# Altium schematic symbol library Schlib1.SchLib: 72 symbols (part 2 of 3)
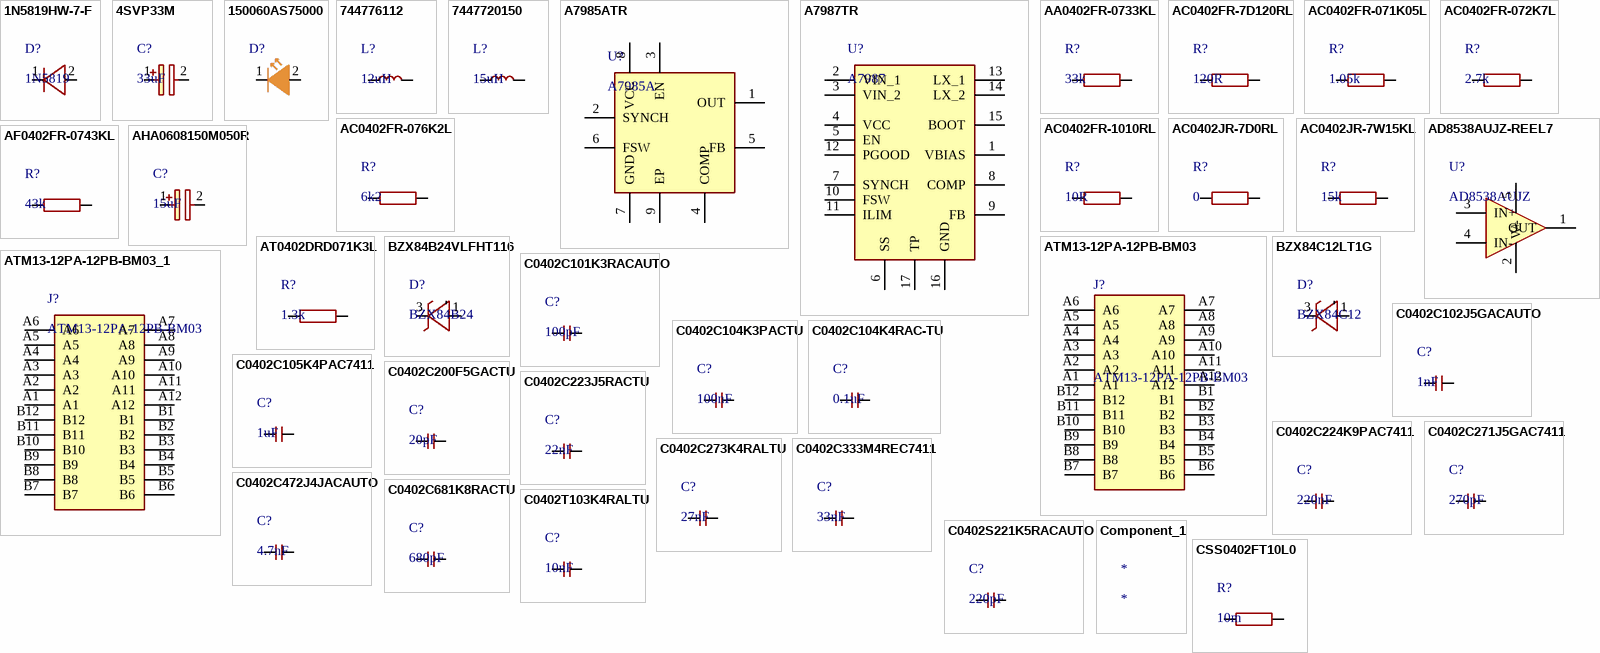
[diagram p2: symbols 1N5819HW-7-F to CSS0402FT10L0]

## C0402C271J5GAC7411
designator C?, comment 270pF
Ceramic Capacitor, Multilayer, Ceramic, 50V, 5% +Tol, 5% -Tol, C0G, 30ppm/Cel TC, 0.00027uF, Surface Mount, 0402; Manufacturer: KEMET; Manufacturer Part Number: C0402C271J5GAC7411; Multilayer: Yes; Supplier: Mouser; Supplier Part Number: 80-C0402C271J5G7411; RoHS: Yes; Category: Ceramic Capacitors; Stock: 143215; Pricing: 1=0.1, 10=0.018, 50=0.018, 100=0.011, 1000=0.008, 10000=0.007 (USD); Mounting Technology: Surface Mount; Pins: 2; Dielectric Material: Ceramic; Package Shape: Rectangular; Case/Package: 0402; Terminal Finish: Nickel; Min Operating Temperature: -55°C; Max Operating Temperature: 125°C; JESD-609 Code: e3; Value: 270pF; Capacitor Type: Ceramic; Tolerance  (fill in as +-): 5%; Package Style: SMTMeter; Packaging: Tape and Reel; Tolerance (fill in as +-): 5%; Rated DC Voltage (URdc): 50V; Temperature Characteristics Code: C0G; Termination: Wraparound; Length: 1mm; Width: 0.5mm; Height: 0.5mm; Reach SVHC Compliant: Yes; RoHS Compliant: Yes; ComponentLink1URL: https://datasheet.ciiva.com:443/pdfs/VipMasterIC/IC/KEME/KEME-S-A0005605168/KEME-S-A0005605168-1.pdf?src-supplier=IHS+Markit; ComponentLink1Description: https://datasheet.ciiva.com:443/pdfs/VipMasterIC/IC/KEME/KEME-S-A0005605168/KEME-S-A0005605168-1.pdf?src-supplier=IHS+Markit
footprint C0402
pins: 1, 2

## C0402C273K4RALTU
designator C?, comment 27nF
.027Uf 16.0V Rohs Compliant: No; Manufacturer: KEMET; Manufacturer Part Number: C0402C273K4RALTU; Supplier: Mouser; Supplier Part Number: 80-C0402C273K4RALTU; RoHS: No; Stock: 9745; Pricing: 1=0.57, 10=0.374, 50=0.374, 100=0.225, 1000=0.167, 10000=0.115 (USD)
footprint C0402
pins: 1, 2

## C0402C333M4REC7411
designator C?, comment 33nF
Ceramic Capacitor, Multilayer, Ceramic, 16V, 20% +Tol, 20% -Tol, X7R, 15% TC, 0.033uF, Surface Mount, 0402; Manufacturer: KEMET; Manufacturer Part Number: C0402C333M4REC7411; Supplier: Mouser; Supplier Part Number: 80-C0402C333M4RECLR; RoHS: Yes; Category: Ceramic Capacitors; Stock: 47561; Pricing: 1=0.1, 10=0.059, 50=0.059, 100=0.036, 1000=0.026, 10000=0.018 (USD); Pins: 2; Dielectric Material: Ceramic; Capacitor Type: Ceramic; Reach SVHC Compliant: Yes; RoHS Compliant: Yes; ComponentLink1URL: https://datasheet.ciiva.com:443/pdfs/VipMasterIC/IC/KEME/KEME-S-A0008958450/KEME-S-A0008958450-1.pdf?src-supplier=IHS+Markit; ComponentLink1Description: https://datasheet.ciiva.com:443/pdfs/VipMasterIC/IC/KEME/KEME-S-A0008958450/KEME-S-A0008958450-1.pdf?src-supplier=IHS+Markit; ComponentLink2URL: https://api.kemet.com/component-edge/download/datasheet/C0402C333M4REC7411.pdf?src-supplier=Digikey; ComponentLink2Description: https://api.kemet.com/component-edge/download/datasheet/C0402C333M4REC7411.pdf?src-supplier=Digikey
footprint C0402
pins: 1, 2

## C0402C472J4JACAUTO
designator C?, comment 4.7nF
Cap Ceramic 0.0047uF 16V U2J 5% Pad SMD 0402 125C T/R; Manufacturer: KEMET; Manufacturer Part Number: C0402C472J4JACAUTO; Supplier: Mouser; Supplier Part Number: 80-C0402C472J4JAUTO; RoHS: No; Category: Ceramic Capacitors; Stock: 12001; Pricing: 1=0.48, 10=0.311, 50=0.311, 100=0.216, 1000=0.162, 10000=0.112 (USD)
footprint C0402
pins: 1, 2

## C0402C681K8RACTU
designator C?, comment 680pF
Ceramic Capacitor, Multilayer, Ceramic, 10V, 10% +Tol, 10% -Tol, X7R, 15% TC, 0.00068uF, Surface Mount, 0402; Manufacturer: KEMET; Manufacturer Part Number: C0402C681K8RACTU; Multilayer: Yes; Supplier: Mouser; Supplier Part Number: 80-C0402C681K8RACTU; RoHS: Yes; Category: Capacitors; Stock: 44783; Pricing: 1=0.34, 10=0.202, 50=0.202, 100=0.132, 1000=0.095, 10000=0.077 (USD); Mounting Technology: Surface Mount; Pins: 2; Dielectric Material: Ceramic; Case/Package: 0402; Terminal Finish: Nickel; Package Shape: Rectangular; Min Operating Temperature: -55°C; Max Operating Temperature: 125°C; JESD-609 Code: e3; Value: 680pF; Capacitor Type: Ceramic; Tolerance  (fill in as +-): 10%; Package Style: SMTMeter; Packaging: Tape and Reel; Tolerance (fill in as +-): 10%; Rated DC Voltage (URdc): 10V; Temperature Characteristics Code: X7R; Termination: Wraparound; Length: 1mm; Width: 0.5mm; Height: 0.5mm; Reach SVHC Compliant: Yes; RoHS Compliant: Yes; ComponentLink1URL: https://datasheet.ciiva.com:443/pdfs/VipMasterIC/IC/KEME/KEME-S-A0008991654/KEME-S-A0008991654-1.pdf?src-supplier=IHS+Markit; ComponentLink1Description: https://datasheet.ciiva.com:443/pdfs/VipMasterIC/IC/KEME/KEME-S-A0008991654/KEME-S-A0008991654-1.pdf?src-supplier=IHS+Markit
footprint C0402
pins: 1, 2

## C0402S221K5RACAUTO
designator C?, comment 220pF
Ceramic Capacitor, Multilayer, Ceramic, 50V, 10% +Tol, 10% -Tol, X7R, 15% TC, 0.00022uF, Surface Mount, 0402; Manufacturer: KEMET; Manufacturer Part Number: C0402S221K5RACAUTO; Supplier: Mouser; Supplier Part Number: 80-C0402S221K5RAUTO; RoHS: Yes; Category: Ceramic Capacitors; Stock: 19717; Pricing: 1=0.43, 10=0.225, 50=0.225, 100=0.163, 1000=0.127, 10000=0.098 (USD); Pins: 2; Dielectric Material: Ceramic; Capacitor Type: Ceramic; Reach SVHC Compliant: Yes; RoHS Compliant: Yes; ComponentLink1URL: https://datasheet.ciiva.com:443/pdfs/VipMasterIC/IC/KEME/KEME-S-A0008958426/KEME-S-A0008958426-1.pdf?src-supplier=IHS+Markit; ComponentLink1Description: https://datasheet.ciiva.com:443/pdfs/VipMasterIC/IC/KEME/KEME-S-A0008958426/KEME-S-A0008958426-1.pdf?src-supplier=IHS+Markit
footprint C0402
pins: 1, 2

## C0402T103K4RALTU
designator C?, comment 10nF
Ceramic Capacitor, Multilayer, Ceramic, 16V, 10% +Tol, 10% -Tol, X7R, 15% TC, 0.01uF, Surface Mount, 0402; Manufacturer: KEMET; Manufacturer Part Number: C0402T103K4RALTU; Multilayer: Yes; Supplier: Mouser; Supplier Part Number: 80-C0402T103K4RALTU; RoHS: No; Category: Ceramic Capacitors; Stock: 17779; Pricing: 1=0.58, 10=0.42, 50=0.42, 100=0.337, 1000=0.294, 10000=0.246 (USD); Mounting Technology: Surface Mount; Pins: 2; Dielectric Material: Ceramic; Package Shape: Rectangular; Case/Package: 0402; Terminal Finish: Nickel; Min Operating Temperature: -55°C; Max Operating Temperature: 125°C; JESD-609 Code: e0; Value: 10nF; Capacitor Type: Ceramic; Tolerance  (fill in as +-): 10%; Package Style: SMTMeter; Packaging: Tape and Reel; Tolerance (fill in as +-): 10%; Rated DC Voltage (URdc): 16V; Temperature Characteristics Code: X7R; Termination: Wraparound; Length: 1mm; Width: 0.5mm; Height: 0.5mm; RoHS Compliant: No; Reach SVHC Compliant: No; ComponentLink1URL: https://datasheet.ciiva.com:443/pdfs/VipMasterIC/IC/KEME/KEME-S-A0008487487/KEME-S-A0008487487-1.pdf?src-supplier=IHS+Markit; ComponentLink1Description: https://datasheet.ciiva.com:443/pdfs/VipMasterIC/IC/KEME/KEME-S-A0008487487/KEME-S-A0008487487-1.pdf?src-supplier=IHS+Markit; ComponentLink2URL: https://datasheet.ciiva.com/15379/kem-c1027-x7r-cots-smd-15379193.pdf?src-supplier=Mouser; ComponentLink2Description: https://datasheet.ciiva.com/15379/kem-c1027-x7r-cots-smd-15379193.pdf?src-supplier=Mouser; ComponentLink3URL: https://datasheet.ciiva.com/148/kem-c1027-x7r-cots-smd-148853.pdf?src-supplier=Digikey; ComponentLink3Description: https://datasheet.ciiva.com/148/kem-c1027-x7r-cots-smd-148853.pdf?src-supplier=Digikey; ComponentLink4URL: https://datasheet.ciiva.com/148/kem-c1027-x7r-cots-smd-148851.pdf?src-supplier=Digikey; ComponentLink4Description: https://datasheet.ciiva.com/148/kem-c1027-x7r-cots-smd-148851.pdf?src-supplier=Digikey; ComponentLink5URL: https://datasheet.ciiva.com/148/kem-c1027-x7r-cots-smd-148852.pdf?src-supplier=Digikey; ComponentLink5Description: https://datasheet.ciiva.com/148/kem-c1027-x7r-cots-smd-148852.pdf?src-supplier=Digikey
footprint C0402
pins: 1, 2

## Component_1
designator *

## CSS0402FT10L0
designator R?, comment 10m
Fixed Resistor, Metal Alloy, 0.33W, 0.01ohm, 1% +/-Tol, 100ppm/Cel, Surface Mount, 0402; Manufacturer: Stackpole Electronics; Manufacturer Part Number: CSS0402FT10L0; Supplier: Mouser; Supplier Part Number: 708-CSS0402FT10L0; RoHS: Yes; Category: Chip SMD Resistors; Stock: 3752; Pricing: 1=0.44, 10=0.272, 50=0.225, 100=0.187, 1000=0.142, 10000=0.116 (USD)
footprint CSS0402FT10L0
pins: 1, 2

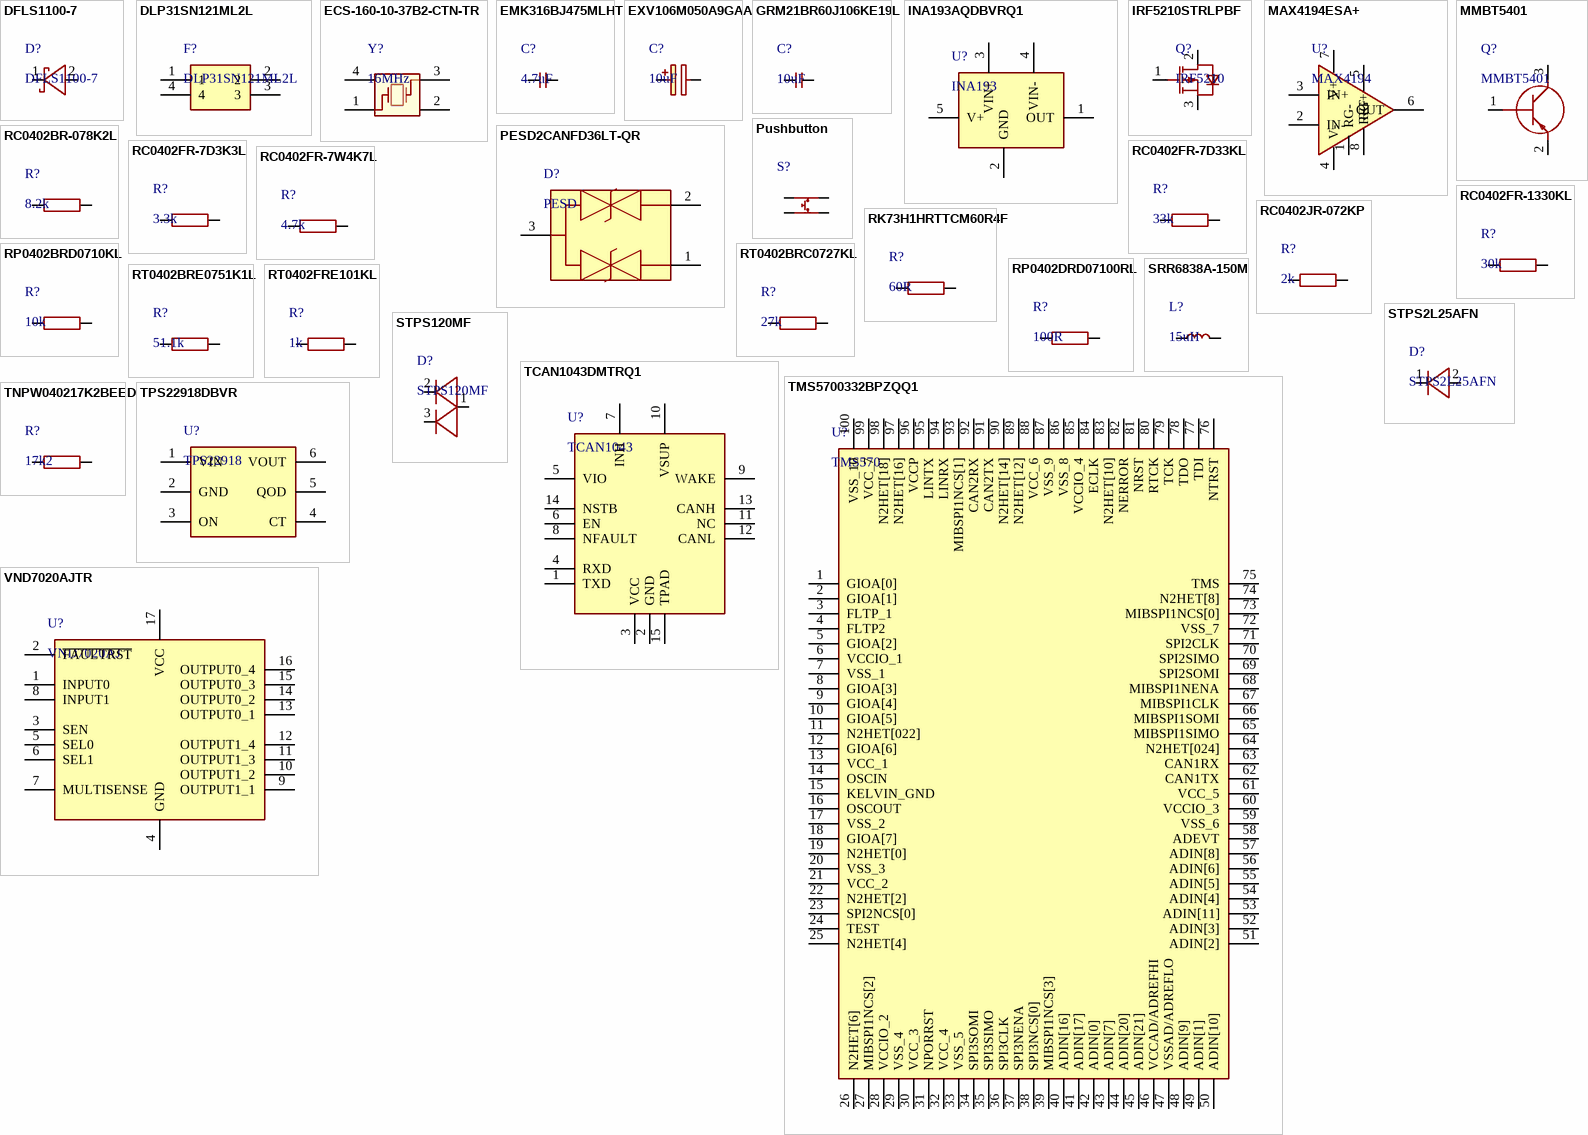
[diagram p1: symbols DFLS1100-7 to VND7020AJTR]

## DFLS1100-7
designator D?
Rectifier Diode, Schottky, 1 Phase, 1 Element, 1A, 100V V(RRM), Silicon; Manufacturer: Diodes; Package Body Material: Plastic; Case Connection: CATHODE; Forward Voltage: 770mV; Non-rep Pk Forward Current-Max: 40A; Number of Elements: 1; Time @ Peak Reflow Temperature-Max (s): 40s; Qualification Status: Not Qualified; Supplier: Digikey; Supplier Part Number: DFLS1100DICT-ND; Manufacturer Part Number: DFLS1100-7; RoHS: Yes; Category: Rectifier Diodes; Stock: 32532; Pricing: 1=0.4, 10=0.34, 100=0.2363, 500=0.18452, 1000=0.14998 (USD); Pins: 2; Diode Element Material: SILICON; Package Shape: Rectangular; Terminal Finish: Tin; Min Operating Temperature: -55°C; Max Operating Temperature: 175°C; JESD-609 Code: e3; Diode Type: RECTIFIER; JESD-30 Code: R-PDSO-F2; Moisture Sensitivity Level: 1; Max Output current: 1A; Package Style: SMALL OUTLINEMeter; Peak Reflow Temperature (Cel): 260°C; Rep Pk Reverse Voltage-Max: 100V; Surface Mount: Yes; Technology: SCHOTTKY; Terminal Form: Flat; Terminal Position: DUAL; RoHS Compliant: Yes; Reach SVHC Compliant: No; ComponentLink1URL: https://datasheet.ciiva.com:443/pdfs/VipMasterIC/IC/DIOD/DIOD-S-A0001756819/DIOD-S-A0001756819-1.pdf?src-supplier=IHS+Markit; ComponentLink1Description: https://datasheet.ciiva.com:443/pdfs/VipMasterIC/IC/DIOD/DIOD-S-A0001756819/DIOD-S-A0001756819-1.pdf?src-supplier=IHS+Markit; ComponentLink2URL: https://datasheet.ciiva.com/4715/ds30497-81105-4715653.pdf?src-supplier=Mouser; ComponentLink2Description: https://datasheet.ciiva.com/4715/ds30497-81105-4715653.pdf?src-supplier=Mouser; ComponentLink3URL: https://datasheet.ciiva.com/6932/ds30497-6932064.pdf?src-supplier=Newark; ComponentLink3Description: https://datasheet.ciiva.com/6932/ds30497-6932064.pdf?src-supplier=Newark; ComponentLink4URL: https://datasheet.ciiva.com/4245/2460ds30497-4245287.pdf?src-supplier=Arrow+Electronics; ComponentLink4Description: https://datasheet.ciiva.com/4245/2460ds30497-4245287.pdf?src-supplier=Arrow+Electronics; ComponentLink5URL: https://datasheet.ciiva.com/22695/1915475-22695803.pdf?src-supplier=Element14; ComponentLink5Description: https://datasheet.ciiva.com/22695/1915475-22695803.pdf?src-supplier=Element14; ComponentLink6URL: https://datasheet.ciiva.com/7964/ds30497-7964246.pdf?src-supplier=Element14; ComponentLink6Description: https://datasheet.ciiva.com/7964/ds30497-7964246.pdf?src-supplier=Element14; ComponentLink7URL: https://datasheet.ciiva.com/914/ds30497-914548.pdf?src-supplier=Digikey; ComponentLink7Description: https://datasheet.ciiva.com/914/ds30497-914548.pdf?src-supplier=Digikey; ComponentLink8URL: https://datasheet.ciiva.com/914/ds30497-914549.pdf?src-supplier=Digikey; ComponentLink8Description: https://datasheet.ciiva.com/914/ds30497-914549.pdf?src-supplier=Digikey; ComponentLink9URL: https://datasheet.ciiva.com/914/ds30497-914550.pdf?src-supplier=Digikey; ComponentLink9Description: https://datasheet.ciiva.com/914/ds30497-914550.pdf?src-supplier=Digikey
footprint DFLS110
pins: 1 K, 2 A

## DLP31SN121ML2L
designator F?
Data Line Filter, 2 Function(s), 16V, 0.1A, 4 Pin(s); Manufacturer: Murata; DC Resistance-Max: 2R; Insulation Resistance-Min: 100MR; Channels: 2; Output Impedance: 120R; Current Rating: 100mA; Supplier: Mouser; Supplier Part Number: 81-DLP31SN121ML2L; Manufacturer Part Number: DLP31SN121ML2L; RoHS: Yes; Category: Common Mode Chokes; Stock: 3150; Pricing: 1=1.54, 10=1.27, 50=1.07, 100=1.05, 1000=0.985, 10000=0.771 (USD); Mounting Technology: Surface Mount; Terminal Finish: Silver; Min Operating Temperature: -40°C; Max Operating Temperature: 85°C; JESD-609 Code: e4; Filter Type: DATA LINE FILTER; Packaging: Tape and Reel; Voltage Rating: 16V; Length: 3.2mm; Width: 1.6mm; Height: 1.15mm; Reach SVHC Compliant: Yes; RoHS Compliant: Yes; ComponentLink1URL: https://datasheet.ciiva.com:443/pdfs/VipMasterIC/IC/MURE/MURE-S-A0008512825/MURE-S-A0008513091-1.pdf?src-supplier=IHS+Markit; ComponentLink1Description: https://datasheet.ciiva.com:443/pdfs/VipMasterIC/IC/MURE/MURE-S-A0008512825/MURE-S-A0008513091-1.pdf?src-supplier=IHS+Markit; ComponentLink2URL: https://datasheet.ciiva.com/11799/0900766b80f15482-11799553.pdf?src-supplier=Rs; ComponentLink2Description: https://datasheet.ciiva.com/11799/0900766b80f15482-11799553.pdf?src-supplier=Rs; ComponentLink3URL: https://datasheet.ciiva.com/25666/l0114s0129dlp31s-25666023.pdf?src-supplier=Future+Electronics; ComponentLink3Description: https://datasheet.ciiva.com/25666/l0114s0129dlp31s-25666023.pdf?src-supplier=Future+Electronics; ComponentLink4URL: https://datasheet.ciiva.com/6214/l0114s0129dlp31s-6214636.pdf?src-supplier=Digikey; ComponentLink4Description: https://datasheet.ciiva.com/6214/l0114s0129dlp31s-6214636.pdf?src-supplier=Digikey; ComponentLink5URL: https://datasheet.ciiva.com/6214/l0114s0129dlp31s-6214639.pdf?src-supplier=Digikey; ComponentLink5Description: https://datasheet.ciiva.com/6214/l0114s0129dlp31s-6214639.pdf?src-supplier=Digikey; ComponentLink6URL: https://datasheet.ciiva.com/3068/l0114s0129dlp31s-3068654.pdf?src-supplier=Avnet; ComponentLink6Description: https://datasheet.ciiva.com/3068/l0114s0129dlp31s-3068654.pdf?src-supplier=Avnet; ComponentLink7URL: https://datasheet.ciiva.com/4942/muratadl-plseries-202927-4942133.pdf?src-supplier=Mouser; ComponentLink7Description: https://datasheet.ciiva.com/4942/muratadl-plseries-202927-4942133.pdf?src-supplier=Mouser
footprint DLP31SN121ML2B
pins: 1, 2, 3, 4

## ECS-160-10-37B2-CTN-TR
designator Y?, comment 16MHz
Crystal 16MHz 10pF 4-Pin SMD ECX-1637B2 T/R; Manufacturer: ECS International; Manufacturer Part Number: ECS-160-10-37B2-CTN-TR; Supplier: Mouser; Supplier Part Number: 520-160-10-37B2CTNTR; RoHS: No; Stock: 8732; Pricing: 1=0.28, 10=0.238, 50=0.238, 100=0.232, 1000=0.213, 10000=0.169 (USD); ComponentLink1URL: https://datasheet.octopart.com/ECS-160-10-37B2-CTN-TR-ECS-International-datasheet-163707945.pdf?src-supplier=Master+Electronics; ComponentLink1Description: https://datasheet.octopart.com/ECS-160-10-37B2-CTN-TR-ECS-International-datasheet-163707945.pdf?src-supplier=Master+Electronics
footprint ECS1601037B2CTNTR
pins: 1, 2, 3, 4

## EMK316BJ475MLHT
designator C?, comment 4.7uF
Ceramic Capacitor, Multilayer, Ceramic, 16V, 20% +Tol, 20% -Tol, X5R, 15% TC, 4.7uF, Surface Mount, 1206; Manufacturer: Taiyo Yuden; Manufacturer Part Number: EMK316BJ475MLHT; Supplier: Mouser; Supplier Part Number: 963-EMK316BJ475MLHT; RoHS: No; Category: Ceramic Capacitors; Pricing: 1=0.3, 10=0.182, 50=0.182, 100=0.118, 1000=0.085, 10000=0.063 (USD); ComponentLink1URL: https://ds.yuden.co.jp/TYCOMPAS/ut/detail?pn=EMK316BJ475MLHT &amp;u=M&src-supplier=Digikey; ComponentLink1Description: https://ds.yuden.co.jp/TYCOMPAS/ut/detail?pn=EMK316BJ475MLHT &amp;u=M&src-supplier=Digikey
footprint CAPC3216X180N
pins: 1, 2

## EXV106M050A9GAA
designator C?, comment 10uF
Aluminum Electrolytic Capacitor, Polarized, Aluminum (wet), 50V, 20% +Tol, 20% -Tol, 10uF, Surface Mount, 2626; Manufacturer: KEMET; Manufacturer Part Number: EXV106M050A9GAA; Dielectric Material: Aluminium; ESR (Equivalent Series Resistance): 2.6R; Leakage Current: 5uA; Ripple Current: 98mA; Tan Delta: 0.12; Supplier: Mouser; Supplier Part Number: 80-EXV106M050A9GAA; RoHS: Yes; Category: Aluminum Electrolytic Capacitors; Stock: 17264; Pricing: 1=0.48, 10=0.255, 50=0.255, 100=0.165, 1000=0.139, 10000=0.112 (USD); Mounting Technology: Surface Mount; Pins: 2; Package Shape: Cylindrical; Case/Package: 2626; Min Operating Temperature: -55°C; Max Operating Temperature: 105°C; Polarity: Polarized; Value: 10uF; Capacitor Type: Aluminium; Tolerance  (fill in as +-): 20%; Package Style: SMTMeter; Packaging: Tape and Reel; Tolerance (fill in as +-): 20%; Rated DC Voltage (URdc): 50V; Termination: Flat; Length: 7.8mm; Width: 6.6mm; Height: 5.4mm; Reach SVHC Compliant: Yes; RoHS Compliant: Yes; ComponentLink1URL: https://datasheet.ciiva.com:443/pdfs/VipMasterIC/IC/KEME/KEME-S-A0009591402/KEME-S-A0009591402-1.pdf?src-supplier=IHS+Markit; ComponentLink1Description: https://datasheet.ciiva.com:443/pdfs/VipMasterIC/IC/KEME/KEME-S-A0009591402/KEME-S-A0009591402-1.pdf?src-supplier=IHS+Markit; ComponentLink2URL: https://datasheet.ciiva.com/22698/1500293-22698078.pdf?src-supplier=Element14; ComponentLink2Description: https://datasheet.ciiva.com/22698/1500293-22698078.pdf?src-supplier=Element14
footprint CAPAE660X565N
pins: 1 +, 2

## GRM21BR60J106KE19L
designator C?, comment 10uF
Ceramic Capacitor, Multilayer, Ceramic, 6.3V, 10% +Tol, 10% -Tol, X5R, 15% TC, 10uF, Surface Mount, 0805; Manufacturer: Murata; Manufacturer Part Number: GRM21BR60J106KE19L; Multilayer: Yes; Supplier: Arrow Electronics; Supplier Part Number: GRM21BR60J106KE19L; RoHS: Yes; Category: Ceramic Capacitors; Stock: 462000; Pricing: 3000=0.0427, 9000=0.0414, 24000=0.037, 45000=0.0357 (USD); Mounting Technology: Surface Mount; Pins: 2; Dielectric Material: Ceramic; Package Shape: Rectangular; Case/Package: 0805; Terminal Finish: Nickel; Min Operating Temperature: -55°C; Max Operating Temperature: 85°C; JESD-609 Code: e3; Value: 10uF; Capacitor Type: Ceramic; Tolerance  (fill in as +-): 10%; Package Style: SMTMeter; Packaging: Tape and Reel; Tolerance (fill in as +-): 10%; Rated DC Voltage (URdc): 6.3V; Temperature Characteristics Code: X5R; Termination: Wraparound; Length: 2mm; Width: 1.25mm; Height: 1.25mm; Reach SVHC Compliant: Yes; RoHS Compliant: Yes; ComponentLink1URL: https://datasheet.ciiva.com:443/pdfs/VipMasterIC/IC/MURE/MURE-S-A0004349797/MURE-S-A0004361791-1.pdf?src-supplier=IHS+Markit; ComponentLink1Description: https://datasheet.ciiva.com:443/pdfs/VipMasterIC/IC/MURE/MURE-S-A0004349797/MURE-S-A0004361791-1.pdf?src-supplier=IHS+Markit; ComponentLink2URL: https://datasheet.ciiva.com/3777/131grm21br60j106ke1923-3777038.pdf?src-supplier=Arrow+Electronics; ComponentLink2Description: https://datasheet.ciiva.com/3777/131grm21br60j106ke1923-3777038.pdf?src-supplier=Arrow+Electronics; ComponentLink3URL: https://datasheet.ciiva.com/136/product-136502.pdf?src-supplier=Digikey; ComponentLink3Description: https://datasheet.ciiva.com/136/product-136502.pdf?src-supplier=Digikey; ComponentLink4URL: https://datasheet.ciiva.com/19476/1858851-19476205.pdf?src-supplier=Jameco; ComponentLink4Description: https://datasheet.ciiva.com/19476/1858851-19476205.pdf?src-supplier=Jameco; ComponentLink5URL: https://datasheet.ciiva.com/7719/608985-7719084.pdf?src-supplier=Element14; ComponentLink5Description: https://datasheet.ciiva.com/7719/608985-7719084.pdf?src-supplier=Element14; ComponentLink6URL: https://datasheet.ciiva.com/136/product-136500.pdf?src-supplier=Digikey; ComponentLink6Description: https://datasheet.ciiva.com/136/product-136500.pdf?src-supplier=Digikey; ComponentLink7URL: https://datasheet.ciiva.com/136/product-136501.pdf?src-supplier=Digikey; ComponentLink7Description: https://datasheet.ciiva.com/136/product-136501.pdf?src-supplier=Digikey
footprint CAPC2012X145N
pins: 1, 2

## INA193AQDBVRQ1
designator U?, comment INA193
Operational Amplifier, 1 Func, PDSO5; Manufacturer: Texas Instruments; Manufacturer Part Number: INA193AQDBVRQ1; Package Body Material: Plastic; Adjustable Threshold: No; Throw Configuration: POWER SUPPLY SUPPORT CIRCUIT; Number of Channels: 1; Package Equivalence Code: TSOP5/6,.11,37; Power Supplies: 12V; Supply Current-Max (Isup): 1.25mA; Max Supply Voltage: 18V; Min Supply Voltage: 2.7V; Qualification Status: Not Qualified; Supplier: Mouser; Supplier Part Number: 595-INA193AQDBVRQ1; RoHS: Yes; Category: Amplifiers - Op Amps, Buffer, Instrumentation; Stock: 19974; Pricing: 1=4.07, 10=3.08, 50=2.83, 100=2.56, 1000=2.29, 10000=2.18 (USD); Case/Package: LSSOP; Pins: 5; Package Shape: Rectangular; Terminal Finish: Nickel; Min Operating Temperature: -40°C; Max Operating Temperature: 125°C; JESD-609 Code: e4; JESD-30 Code: R-PDSO-G5; Moisture Sensitivity Level: 2; Channels: 1; Package Style: SMALL OUTLINE, LOW PROFILE, SHRINK PITCHMeter; Peak Reflow Temperature (Cel): 260°C; Nominal Supply Voltage: 12V; Surface Mount: Yes; Terminal Form: Gull Wing; Terminal Position: DUAL; Length: 2.9mm; Width: 1.6mm; Height - Seated (Max): 1.45mm; Terminal Pitch: 0.95mm; Temperature Grade: AUTOMOTIVE; Reach SVHC Compliant: Yes; RoHS Compliant: Yes; ComponentLink1URL: https://www.ti.com:443/lit/ds/symlink/ina193a-q1.pdf?src-supplier=IHS+Markit; ComponentLink1Description: https://www.ti.com:443/lit/ds/symlink/ina193a-q1.pdf?src-supplier=IHS+Markit; ComponentLink2URL: https://datasheet.ciiva.com/1939/ina193a-q1-1939597.pdf?src-supplier=Digikey; ComponentLink2Description: https://datasheet.ciiva.com/1939/ina193a-q1-1939597.pdf?src-supplier=Digikey; ComponentLink3URL: https://datasheet.ciiva.com/1577/1383809-1577443.pdf?src-supplier=Newark; ComponentLink3Description: https://datasheet.ciiva.com/1577/1383809-1577443.pdf?src-supplier=Newark; ComponentLink4URL: https://datasheet.ciiva.com/4875/sbos366c-126160-4875330.pdf?src-supplier=Mouser; ComponentLink4Description: https://datasheet.ciiva.com/4875/sbos366c-126160-4875330.pdf?src-supplier=Mouser; ComponentLink5URL: https://datasheet.ciiva.com/15134/getdatasheetpartid-255678-15134586.pdf?src-supplier=Verical; ComponentLink5Description: https://datasheet.ciiva.com/15134/getdatasheetpartid-255678-15134586.pdf?src-supplier=Verical; ComponentLink6URL: https://datasheet.ciiva.com/2977/ina198a-q1-2977933.pdf?src-supplier=Avnet; ComponentLink6Description: https://datasheet.ciiva.com/2977/ina198a-q1-2977933.pdf?src-supplier=Avnet; ComponentLink7URL: https://datasheet.ciiva.com/2977/ina198a-q1-2977934.pdf?src-supplier=Avnet; ComponentLink7Description: https://datasheet.ciiva.com/2977/ina198a-q1-2977934.pdf?src-supplier=Avnet
footprint SOT95P280X145-5N
pins: 1 OUT, 2 GND, 3 VIN+, 4 VIN-, 5 V+

## IRF5210STRLPBF
designator Q?, comment IRF5210
Zener Diode, 24V V(Z), 2.08%, 0.25W, Silicon, Unidirectional; Manufacturer: Infineon; Manufacturer Part Number: IRF5210STRLPBF; Package Body Material: Plastic; Polarity/Channel Type: P-CHANNEL; Avalanche Energy Rating (Eas): 120mJ; Case Connection: DRAIN; Drain Current-Max (ID): 38A; Drain-source On Resistance-Max: 60mR; DS Breakdown Voltage-Min: 100V; FET Technology: METAL-OXIDE SEMICONDUCTOR; Number of Elements: 1; Operating Mode: ENHANCEMENT MODE; Pulsed Drain Current-Max (IDM): 140A; Transistor Application: SWITCHING; Time @ Peak Reflow Temperature-Max (s): 30s; Power Dissipation-Max (Abs): 170W; JEDEC-95 Code: TO-263AB; Qualification Status: Not Qualified; Supplier: Mouser; Supplier Part Number: 942-IRF5210STRLPBF; RoHS: Yes; Category: MOSFETs; Stock: 11429; Pricing: 1=3.62, 10=1.73, 50=1.69, 100=1.69, 1000=1.33, 10000=1.33 (USD); Pins: 2; Package Shape: Rectangular; Transistor Element Material: SILICON; Terminal Finish: Nickel; Max Operating Temperature: 150°C; JESD-30 Code: R-PSSO-G2; Package Style: SMALL OUTLINEMeter; Surface Mount: Yes; Terminal Form: Gull Wing; Terminal Position: SINGLE; JESD-609 Code: e3; Moisture Sensitivity Level: 1; Peak Reflow Temperature (Cel): 260°C; Drain Current-Max (Abs) (ID): 38A; RoHS Compliant: Yes; Reach SVHC Compliant: No; ComponentLink1URL: https://datasheet.ciiva.com:443/pdfs/VipMasterIC/IC/IRSD/IRSDS18784/IRSDS18784-1.pdf?src-supplier=IHS+Markit; ComponentLink1Description: https://datasheet.ciiva.com:443/pdfs/VipMasterIC/IC/IRSD/IRSDS18784/IRSDS18784-1.pdf?src-supplier=IHS+Markit; Diode Type: ZENER; ComponentLink2URL: https://datasheet.ciiva.com:443/pdfs/VipMasterIC/IC/ROHM/ROHM-S-A0007698973/ROHM-S-A0007882604-1.pdf?src-supplier=IHS+Markit; ComponentLink2Description: https://datasheet.ciiva.com:443/pdfs/VipMasterIC/IC/ROHM/ROHM-S-A0007698973/ROHM-S-A0007882604-1.pdf?src-supplier=IHS+Markit; ComponentLink3URL: https://www.rohm.com/datasheet/BZX84B24VLFH/bzx84b24vlfht116-e?src-supplier=Digikey; ComponentLink3Description: https://www.rohm.com/datasheet/BZX84B24VLFH/bzx84b24vlfht116-e?src-supplier=Digikey
footprint TO254P1528X508-4_3N-V1 (TO,2.54mm pitch;3 pin,15.28mm L X 9.00mm W X 5.08mm H body)
pins: 1 GATE, 2 DRAIN, 3 SOURCE

## MAX4194ESA+
designator U?, comment MAX4194
Instrumentation Amplifier, 1 Func, 690uV Offset-Max, 0.25MHz Band Width, PDSO8; Manufacturer: Maxim; Manufacturer Part Number: MAX4194ESA+; Package Body Material: Plastic; Average Bias Current-Max (IIB): 20nA; Bandwidth (3dB)-Nom: 250kHz; Common Mode Rejection Ratio-Min: 73dB; Input Offset Current-Max (IIO): 3nA; Channels: 1; Package Equivalence Code: SOP8,.25; Power Supplies: +-1.35/+-3.75/2.7/7.5V; Slew Rate: 0.06V/µs; Max Supply Current: 110uA; Supply Voltage Limit-Max: 8V; Nominal Supply Voltage: 5V; Time @ Peak Reflow Temperature-Max (s): 30s; Voltage Gain-Max: 10000; Qualification Status: Not Qualified; Supplier: Mouser; Supplier Part Number: 700-MAX4194ESA; RoHS: Yes; Category: Amplifiers - Op Amps, Buffer, Instrumentation; Stock: 2146; Pricing: 1=7.06, 10=5.31, 50=5.17, 100=4.65, 1000=3.83, 10000=3.83 (USD); Case/Package: SOP; Pins: 8; Terminal Finish: Tin; Package Shape: Rectangular; Min Operating Temperature: -40°C; Max Operating Temperature: 85°C; Amplifier Type: INSTRUMENTATION AMPLIFIER; JESD-609 Code: e3; Moisture Sensitivity Level: 1; Input Offset Voltage-Max: 690uV; JESD-30 Code: R-PDSO-G8; Package Style: SMALL OUTLINEMeter; Peak Reflow Temperature (Cel): 260°C; Surface Mount: Yes; Terminal Form: Gull Wing; Terminal Position: DUAL; Voltage Gain-Min: 1; Length: 4.9mm; Width: 3.9mm; Height - Seated (Max): 1.75mm; Terminal Pitch: 1.27mm; Reach SVHC Compliant: Yes; RoHS Compliant: Yes; Temperature Grade: INDUSTRIAL; ComponentLink1URL: https://datasheet.ciiva.com:443/pdfs/VipMasterIC/IC/MAXM/MAXMS15090/MAXMS15090-1.pdf?src-supplier=IHS+Markit; ComponentLink1Description: https://datasheet.ciiva.com:443/pdfs/VipMasterIC/IC/MAXM/MAXMS15090/MAXMS15090-1.pdf?src-supplier=IHS+Markit; ComponentLink2URL: https://datasheet.ciiva.com/2975/max4194-max4197-2975858.pdf?src-supplier=Avnet; ComponentLink2Description: https://datasheet.ciiva.com/2975/max4194-max4197-2975858.pdf?src-supplier=Avnet; ComponentLink3URL: https://datasheet.ciiva.com/14338/max4194-max4197-14338475.pdf?src-supplier=Avnet; ComponentLink3Description: https://datasheet.ciiva.com/14338/max4194-max4197-14338475.pdf?src-supplier=Avnet; ComponentLink4URL: https://datasheet.ciiva.com/1802/max4194-max4197-1802609.pdf?src-supplier=Digikey; ComponentLink4Description: https://datasheet.ciiva.com/1802/max4194-max4197-1802609.pdf?src-supplier=Digikey; ComponentLink5URL: https://datasheet.ciiva.com/1819/max4194-max4197-1819822.pdf?src-supplier=Digikey; ComponentLink5Description: https://datasheet.ciiva.com/1819/max4194-max4197-1819822.pdf?src-supplier=Digikey
footprint SOIC127P600X175-8N
pins: 1 RG-, 2 IN-, 3 IN+, 4 V-, 5 REF, 6 OUT, 7 V+, 8 RG+

## MMBT5401
designator Q?
Small Signal Bipolar Transistor, 0.6A I(C), 150V V(BR)CEO, 1-Element, PNP, Silicon, TO-236; Manufacturer: Diotec; Package Body Material: Plastic; Max Collector Current: 600mA; DC Current Gain-Min (hFE): 50; Number of Elements: 1; Frequency: 100MHz; Qualification Status: Not Qualified; Supplier: Mouser; Supplier Part Number: 637-MMBT5401; Manufacturer Part Number: MMBT5401; RoHS: Yes; Category: BJTs; Stock: 892; Pricing: 1=0.12, 10=0.064, 50=0.064, 100=0.042, 1000=0.03, 10000=0.015 (USD); Pins: 3; Package Shape: Rectangular; Transistor Element Material: SILICON; Max Operating Temperature: 150°C; Polarity/Channel Type: PNP; Collector-emitter Voltage-Max: 150V; JESD-30 Code: R-PDSO-G3; Moisture Sensitivity Level: 1; Package Style: SMALL OUTLINEMeter; Peak Reflow Temperature (Cel): 260°C; Surface Mount: Yes; Terminal Form: Gull Wing; Terminal Position: DUAL; JEDEC-95 Code: TO-236; Reach SVHC Compliant: Yes; RoHS Compliant: Yes; ComponentLink1URL: https://datasheet.ciiva.com:443/pdfs/VipMasterIC/IC/DISE/DISE-S-A0006087454/DISE-S-A0006087454-1.pdf?src-supplier=IHS+Markit; ComponentLink1Description: https://datasheet.ciiva.com:443/pdfs/VipMasterIC/IC/DISE/DISE-S-A0006087454/DISE-S-A0006087454-1.pdf?src-supplier=IHS+Markit; ComponentLink2URL: http://datasheet.octopart.com/MMBT5401-Diotec-datasheet-20771873.pdf?src-supplier=Mouser; ComponentLink2Description: http://datasheet.octopart.com/MMBT5401-Diotec-datasheet-20771873.pdf?src-supplier=Mouser; ComponentLink3URL: http://datasheet.octopart.com/MMBT5401-Diotec-datasheet-20771873.pdf?src-supplier=Distrelec; ComponentLink3Description: http://datasheet.octopart.com/MMBT5401-Diotec-datasheet-20771873.pdf?src-supplier=Distrelec; ComponentLink4URL: http://datasheet.octopart.com/MMBT5401-Diotec-datasheet-20771873.pdf?src-supplier=Arrow+Electronics; ComponentLink4Description: http://datasheet.octopart.com/MMBT5401-Diotec-datasheet-20771873.pdf?src-supplier=Arrow+Electronics; ComponentLink5URL: http://datasheet.octopart.com/MMBT5401-Diotec-datasheet-20771873.pdf?src-supplier=Verical; ComponentLink5Description: http://datasheet.octopart.com/MMBT5401-Diotec-datasheet-20771873.pdf?src-supplier=Verical; ComponentLink6URL: http://datasheet.octopart.com/MMBT5401-Diotec-datasheet-20771873.pdf?src-supplier=Onlinecomponents.com; ComponentLink6Description: http://datasheet.octopart.com/MMBT5401-Diotec-datasheet-20771873.pdf?src-supplier=Onlinecomponents.com; ComponentLink7URL: http://datasheet.octopart.com/MMBT5401-Diotec-datasheet-20771873.pdf?src-supplier=LCSC; ComponentLink7Description: http://datasheet.octopart.com/MMBT5401-Diotec-datasheet-20771873.pdf?src-supplier=LCSC; ComponentLink8URL: https://datasheet.octopart.com/MMBT5401-Diotec-datasheet-116330324.pdf?src-supplier=TME; ComponentLink8Description: https://datasheet.octopart.com/MMBT5401-Diotec-datasheet-116330324.pdf?src-supplier=TME; ComponentLink9URL: http://datasheet.octopart.com/MMBT5401-Diotec-datasheet-20771873.pdf?src-supplier=ComS.I.T.; ComponentLink9Description: http://datasheet.octopart.com/MMBT5401-Diotec-datasheet-20771873.pdf?src-supplier=ComS.I.T.; ComponentLink10URL: http://datasheet.octopart.com/MMBT5401-Diotec-datasheet-20771873.pdf?src-supplier=DComponents; ComponentLink10Description: http://datasheet.octopart.com/MMBT5401-Diotec-datasheet-20771873.pdf?src-supplier=DComponents; ComponentLink11URL: http://datasheet.octopart.com/MMBT5401-Diotec-datasheet-20771873.pdf?src-supplier=Electro+Sonic; ComponentLink11Description: http://datasheet.octopart.com/MMBT5401-Diotec-datasheet-20771873.pdf?src-supplier=Electro+Sonic
footprint SOT95P240X120-3N
pins: 1 B, 2 E, 3 C

## PESD2CANFD36LT-QR
designator D?, comment PESD
ESD Protection Diodes / TVS Diodes ESD protection for in-vehicle networks; Manufacturer: Nexperia; Manufacturer Part Number: PESD2CANFD36LT-QR; Supplier: Mouser; Supplier Part Number: 771-PESD2CANFD36LTQR; RoHS: No; Stock: 13324; Pricing: 1=0.31, 10=0.216, 50=0.216, 100=0.09, 1000=0.074, 10000=0.043 (USD)
footprint PESD2CANFD36LTQR
pins: 1 K1, 2 K2, 3 CC

## Pushbutton
designator S?
BUTON MINI 6X6X5, 4 PINI; Supplier: Sigmanortec; Price: 0.36 RON
footprint Pushbutton
pins: 1, 2, 3, 4

## RC0402BR-078K2L
designator R?, comment 8.2k
Fixed Resistor, Metal Glaze/thick Film, 0.0625W, 8200ohm, 50V, 0.1% +/-Tol, 100ppm/Cel, Surface Mount, 0402; Manufacturer: Yageo; Manufacturer Part Number: RC0402BR-078K2L; Supplier: Mouser; Supplier Part Number: 603-RC0402BR-078K2L; RoHS: Yes; Stock: 8780; Pricing: 1=0.18, 10=0.122, 50=0.098, 100=0.088, 1000=0.059, 10000=0.039 (USD); Reach SVHC Compliant: Yes; RoHS Compliant: Yes
footprint R0402
pins: 1, 2

## RC0402FR-7D3K3L
designator R?, comment 3.3k
Fixed Resistor, Metal Glaze/thick Film, 0.0625W, 3300ohm, 50V, 1% +/-Tol, 100ppm/Cel, Surface Mount, 0402; Manufacturer: Yageo; Manufacturer Part Number: RC0402FR-7D3K3L; Additional Feature: LASER TRIMMABLE; Power: 62.5mW; Rated Temperature: 70°C; Value: 3.3kR; Temperature Coefficient (ppm/Cel): 100; Package Height: 0.35mm; Package Length: 1mm; Package Width: 0.5mm; Supplier: Mouser; Supplier Part Number: 603-RC0402FR-7D3K3L; RoHS: Yes; Category: Resistors; Stock: 400223; Pricing: 1=0.1, 10=0.01, 50=0.01, 100=0.007, 1000=0.006, 10000=0.003 (USD); Mounting Technology: Surface Mount; Pins: 2; Package Shape: Rectangular; Case/Package: 0402; Terminal Finish: Nickel; Min Operating Temperature: -55°C; Max Operating Temperature: 155°C; Tolerance: 1%; JESD-609 Code: e3; Resistor Type: FIXED RESISTOR; Construction: Chip; Packaging: Tape and Reel; Technology: METAL GLAZE/THICK FILM; Termination: Wraparound; Working Voltage: 50V; Reach SVHC Compliant: Yes; RoHS Compliant: Yes
footprint R0402
pins: 1, 2

## RC0402FR-7D33KL
designator R?, comment 33k
Fixed Resistor, Metal Glaze/thick Film, 0.0625W, 33000ohm, 50V, 1% +/-Tol, 100ppm/Cel, Surface Mount, 0402; Manufacturer: Yageo; Manufacturer Part Number: RC0402FR-7D33KL; Supplier: Mouser; Supplier Part Number: 603-RC0402FR-7D33KL; RoHS: Yes; Category: Resistors; Stock: 38172; Pricing: 1=0.1, 10=0.01, 50=0.01, 100=0.007, 1000=0.006, 10000=0.003 (USD)
footprint R0402
pins: 1, 2

## RC0402FR-7W4K7L
designator R?, comment 4.7k
Fixed Resistor, Metal Glaze/thick Film, 0.125W, 4700ohm, 50V, 1% +/-Tol, 200ppm/Cel, Surface Mount, 0402; Manufacturer: Yageo; Manufacturer Part Number: RC0402FR-7W4K7L; Additional Feature: LASER TRIMMABLE; Power: 125mW; Rated Temperature: 70°C; Value: 4.7kR; Temperature Coefficient (ppm/Cel): 200; Package Height: 0.35mm; Package Length: 1mm; Package Width: 0.5mm; Supplier: Mouser; Supplier Part Number: 603-RC0402FR-7W4K7L; RoHS: Yes; Category: Chip SMD Resistors; Stock: 9262; Pricing: 1=0.15, 10=0.015, 50=0.015, 100=0.01, 1000=0.008, 10000=0.003 (USD); Mounting Technology: Surface Mount; Pins: 2; Package Shape: Rectangular; Case/Package: 0402; Terminal Finish: Nickel; Min Operating Temperature: -55°C; Max Operating Temperature: 155°C; Tolerance: 1%; JESD-609 Code: e3; Resistor Type: FIXED RESISTOR; Construction: Chip; Packaging: Tape and Reel; Technology: METAL GLAZE/THICK FILM; Termination: Wraparound; Working Voltage: 50V; Reach SVHC Compliant: Yes; RoHS Compliant: Yes; ComponentLink1URL: https://datasheet.ciiva.com:443/pdfs/VipMasterIC/IC/YAGO/YAGO-S-A0008145938/YAGO-S-A0008145938-1.pdf?src-supplier=IHS+Markit; ComponentLink1Description: https://datasheet.ciiva.com:443/pdfs/VipMasterIC/IC/YAGO/YAGO-S-A0008145938/YAGO-S-A0008145938-1.pdf?src-supplier=IHS+Markit
footprint R0402
pins: 1, 2

## RC0402FR-1330KL
designator R?, comment 30k
Fixed Resistor, Metal Glaze/thick Film, 0.0625W, 30000ohm, 50V, 1% +/-Tol, 100ppm/Cel, Surface Mount, 0402; Manufacturer: Yageo; Manufacturer Part Number: RC0402FR-1330KL; Additional Feature: LASER TRIMMABLE; Power: 62.5mW; Rated Temperature: 70°C; Value: 30kR; Temperature Coefficient (ppm/Cel): 100; Package Height: 0.35mm; Package Length: 1mm; Package Width: 0.5mm; Supplier: Mouser; Supplier Part Number: 603-RC0402FR-1330KL; RoHS: Yes; Category: Chip SMD Resistors; Stock: 104196; Pricing: 1=0.1, 10=0.01, 50=0.01, 100=0.007, 1000=0.006, 10000=0.003 (USD); Mounting Technology: Surface Mount; Pins: 2; Package Shape: Rectangular; Case/Package: 0402; Terminal Finish: Nickel; Min Operating Temperature: -55°C; Max Operating Temperature: 155°C; Tolerance: 1%; JESD-609 Code: e3; Resistor Type: FIXED RESISTOR; Construction: Chip; Packaging: Tape and Reel; Technology: METAL GLAZE/THICK FILM; Termination: Wraparound; Working Voltage: 50V; Reach SVHC Compliant: Yes; RoHS Compliant: Yes; ComponentLink1URL: https://datasheet.ciiva.com:443/pdfs/VipMasterIC/IC/YAGO/YAGO-S-A0008145938/YAGO-S-A0008145938-1.pdf?src-supplier=IHS+Markit; ComponentLink1Description: https://datasheet.ciiva.com:443/pdfs/VipMasterIC/IC/YAGO/YAGO-S-A0008145938/YAGO-S-A0008145938-1.pdf?src-supplier=IHS+Markit; ComponentLink2URL: https://datasheet.ciiva.com/8889/pyu-rc0402-51-rohs-l-6-8889740.pdf?src-supplier=Avnet; ComponentLink2Description: https://datasheet.ciiva.com/8889/pyu-rc0402-51-rohs-l-6-8889740.pdf?src-supplier=Avnet
footprint R0402
pins: 1, 2

## RC0402JR-072KP
designator R?, comment 2k
Fixed Resistor, Metal Glaze/thick Film, 0.0625W, 2000ohm, 50V, 5% +/-Tol, 150ppm/Cel, Surface Mount, 0402; Manufacturer: Yageo; Manufacturer Part Number: RC0402JR-072KP; Supplier: Mouser; Supplier Part Number: 603-RC0402JR-072KP; RoHS: Yes; Category: Uncategorized; Stock: 28128; Pricing: 1=0.2, 10=0.02, 50=0.02, 100=0.013, 1000=0.011, 10000=0.005 (USD)
footprint R0402
pins: 1, 2

## RK73H1HRTTCM60R4F
designator R?, comment 60R
Fixed Resistor, Metal Glaze/thick Film, 0.05W, 60.4ohm, 25V, 1% +/-Tol, 300ppm/Cel, Surface Mount, 0201; Manufacturer: KOA Speer; Manufacturer Part Number: RK73H1HRTTCM60R4F; Supplier: Mouser; Supplier Part Number: 660-RK73H1HRTTCM60R4; RoHS: Yes; Category: LDO; Stock: 38859; Pricing: 1=0.16, 10=0.079, 50=0.079, 100=0.046, 1000=0.028, 10000=0.02 (USD); Reach SVHC Compliant: Yes; RoHS Compliant: Yes
footprint R0201
pins: 1, 2

## RP0402BRD0710KL
designator R?, comment 10k
Resistor, 10K, 0.1%, 0.063W, THIN FILM, 0402;; Manufacturer: Yageo; Manufacturer Part Number: RP0402BRD0710KL; Supplier: Mouser; Supplier Part Number: 603-RP0402BRD0710KL; RoHS: No; Category: Chip SMD Resistors; Stock: 21771; Pricing: 1=0.24, 10=0.171, 50=0.134, 100=0.12, 1000=0.092, 10000=0.074 (USD); ComponentLink1URL: https://datasheet.octopart.com/RP0402BRD0710KL-Yageo-datasheet-179178423.pdf?src-supplier=Newark; ComponentLink1Description: https://datasheet.octopart.com/RP0402BRD0710KL-Yageo-datasheet-179178423.pdf?src-supplier=Newark
footprint R0402
pins: 1, 2

## RP0402DRD07100RL
designator R?, comment 100R
Res, 100R, 0.5%, 0.063W, Thin Film, 0402 Rohs Compliant: Yes; Manufacturer: Yageo; Manufacturer Part Number: RP0402DRD07100RL; Supplier: Mouser; Supplier Part Number: 603-RP0402DRD07100RL; RoHS: No; Category: Chip SMD Resistors; Stock: 9231; Pricing: 1=0.21, 10=0.156, 50=0.122, 100=0.11, 1000=0.073, 10000=0.049 (USD)
footprint R0402
pins: 1, 2

## RT0402BRC0727KL
designator R?, comment 27k
Fixed Resistor, Thin Film, 0.0625W, 27000ohm, 50V, 0.1% +/-Tol, 15ppm/Cel, Surface Mount, 0402; Manufacturer: Yageo; Manufacturer Part Number: RT0402BRC0727KL; Additional Feature: HIGH PRECISION; Power: 62.5mW; Rated Temperature: 70°C; Value: 27kR; Temperature Coefficient (ppm/Cel): 15; Package Height: 0.3mm; Package Length: 1mm; Package Width: 0.5mm; Supplier: Mouser; Supplier Part Number: 603-RT0402BRC0727KL; RoHS: Yes; Category: Chip SMD Resistors; Stock: 4255; Pricing: 1=0.48, 10=0.408, 50=0.408, 100=0.408, 1000=0.408, 10000=0.149 (USD); Mounting Technology: Surface Mount; Pins: 2; Case/Package: 0402; Min Operating Temperature: -55°C; Max Operating Temperature: 155°C; Tolerance: 0.1%; Resistor Type: FIXED RESISTOR; Construction: Chip; Packaging: Tape and Reel; Technology: THIN FILM; Termination: Wraparound; Working Voltage: 50V; Reach SVHC Compliant: Yes; RoHS Compliant: Yes; ComponentLink1URL: https://datasheet.ciiva.com:443/pdfs/VipMasterIC/IC/YAGO/YAGO-S-A0008510989/YAGO-S-A0008510989-1.pdf?src-supplier=IHS+Markit; ComponentLink1Description: https://datasheet.ciiva.com:443/pdfs/VipMasterIC/IC/YAGO/YAGO-S-A0008510989/YAGO-S-A0008510989-1.pdf?src-supplier=IHS+Markit
footprint R0402
pins: 1, 2

## RT0402BRE0751K1L
designator R?, comment 51.1k
Fixed Resistor, Thin Film, 0.0625W, 51100ohm, 50V, 0.1% +/-Tol, 50ppm/Cel, Surface Mount, 0402; Manufacturer: Yageo; Manufacturer Part Number: RT0402BRE0751K1L; Additional Feature: HIGH PRECISION; Power: 62.5mW; Rated Temperature: 70°C; Value: 51.1kR; Temperature Coefficient (ppm/Cel): 50; Package Height: 0.3mm; Package Length: 1mm; Package Width: 0.5mm; Supplier: Mouser; Supplier Part Number: 603-RT0402BRE0751K1L; RoHS: Yes; Category: Chip SMD Resistors; Stock: 6687; Pricing: 1=0.2, 10=0.144, 50=0.113, 100=0.101, 1000=0.068, 10000=0.045 (USD); Mounting Technology: Surface Mount; Pins: 2; Case/Package: 0402; Min Operating Temperature: -55°C; Max Operating Temperature: 155°C; Tolerance: 0.1%; Resistor Type: FIXED RESISTOR; Construction: Chip; Packaging: Tape and Reel; Technology: THIN FILM; Termination: Wraparound; Working Voltage: 50V; Reach SVHC Compliant: Yes; RoHS Compliant: Yes; ComponentLink1URL: https://datasheet.ciiva.com:443/pdfs/VipMasterIC/IC/YAGO/YAGO-S-A0008510989/YAGO-S-A0008510989-1.pdf?src-supplier=IHS+Markit; ComponentLink1Description: https://datasheet.ciiva.com:443/pdfs/VipMasterIC/IC/YAGO/YAGO-S-A0008510989/YAGO-S-A0008510989-1.pdf?src-supplier=IHS+Markit; ComponentLink2URL: http://www.yageo.com/documents/recent/PYu-RT_1-to-0.01_RoHS_L_9.pdf?src-supplier=Digikey; ComponentLink2Description: http://www.yageo.com/documents/recent/PYu-RT_1-to-0.01_RoHS_L_9.pdf?src-supplier=Digikey
footprint R0402
pins: 1, 2

## RT0402FRE101KL
designator R?, comment 1k
Fixed Resistor, Thin Film, 0.0625W, 1000ohm, 50V, 1% +/-Tol, 50ppm/Cel, Surface Mount, 0402; Manufacturer: Yageo; Manufacturer Part Number: RT0402FRE101KL; Supplier: Mouser; Supplier Part Number: 603-RT0402FRE101KL; RoHS: Yes; Category: Chip SMD Resistors; Stock: 2470; Pricing: 1=0.1, 10=0.026, 50=0.026, 100=0.02, 1000=0.015, 10000=0.01 (USD); Reach SVHC Compliant: Yes; RoHS Compliant: Yes
footprint R0402
pins: 1, 2

## SRR6838A-150M
designator L?, comment 15uH
Power Inductors - SMD Ind,6.8x6.8x3.8mm,15uH+/-20%,2.1A,; Manufacturer: Bourns; Manufacturer Part Number: SRR6838A-150M; Supplier: Mouser; Supplier Part Number: 652-SRR6838A-150M; RoHS: No; Stock: 987; Pricing: 1=1.28, 10=0.992, 50=0.992, 100=0.851, 1000=0.723, 10000=0.695 (USD)
footprint INDPM6868X420N
pins: 1, 2

## STPS2L25AFN
designator D?
Rectifier Diode; Manufacturer: STMicroelectronics; Supplier: Farnell; Supplier Part Number: 3387295; Manufacturer Part Number: STPS2L25AFN; RoHS: Yes; Category: Rectifier Diodes; Stock: 3; Pricing: 1=1 (EUR)
footprint SODFL5226X110N
pins: 1 K, 2 A

## STPS120MF
designator D?
Rectifier Diode, Schottky, 1 Phase, 1 Element, 1A, 20V V(RRM), Silicon, DO-222AA; Manufacturer: STMicroelectronics; Package Body Material: Plastic; Case Connection: CATHODE; Forward Voltage: 410mV; Non-rep Pk Forward Current-Max: 50A; Number of Elements: 1; Qualification Status: Not Qualified; Supplier: Mouser; Supplier Part Number: 511-STPS120MF; Manufacturer Part Number: STPS120MF; RoHS: Yes; Category: Rectifier Diodes; Stock: 19149; Pricing: 1=0.28, 10=0.18, 50=0.18, 100=0.118, 1000=0.092, 10000=0.084 (USD); Pins: 2; Diode Element Material: SILICON; Package Shape: Rectangular; Max Operating Temperature: 150°C; Diode Type: RECTIFIER; JESD-30 Code: R-PDSO-F2; Max Output current: 1A; Package Style: SMALL OUTLINEMeter; Rep Pk Reverse Voltage-Max: 20V; Surface Mount: Yes; Technology: SCHOTTKY; Terminal Form: Flat; Terminal Position: DUAL; Reach SVHC Compliant: Yes; RoHS Compliant: Yes; ComponentLink1URL: https://datasheet.ciiva.com:443/pdfs/VipMasterIC/IC/SGST/SGST-S-A0001365098/SGST-S-A0001365098-1.pdf?src-supplier=IHS+Markit; ComponentLink1Description: https://datasheet.ciiva.com:443/pdfs/VipMasterIC/IC/SGST/SGST-S-A0001365098/SGST-S-A0001365098-1.pdf?src-supplier=IHS+Markit; ComponentLink2URL: https://datasheet.ciiva.com/4714/cd00198749-86002-4714686.pdf?src-supplier=Mouser; ComponentLink2Description: https://datasheet.ciiva.com/4714/cd00198749-86002-4714686.pdf?src-supplier=Mouser; ComponentLink3URL: https://datasheet.ciiva.com/16491/cd00198749-16491507.pdf?src-supplier=Future+Electronics; ComponentLink3Description: https://datasheet.ciiva.com/16491/cd00198749-16491507.pdf?src-supplier=Future+Electronics; ComponentLink4URL: https://datasheet.ciiva.com/916/cd00198749-916327.pdf?src-supplier=Digikey; ComponentLink4Description: https://datasheet.ciiva.com/916/cd00198749-916327.pdf?src-supplier=Digikey; ComponentLink5URL: https://datasheet.ciiva.com/916/cd00198749-916328.pdf?src-supplier=Digikey; ComponentLink5Description: https://datasheet.ciiva.com/916/cd00198749-916328.pdf?src-supplier=Digikey; ComponentLink6URL: https://datasheet.ciiva.com/916/cd00198749-916329.pdf?src-supplier=Digikey; ComponentLink6Description: https://datasheet.ciiva.com/916/cd00198749-916329.pdf?src-supplier=Digikey
footprint STPS120MF
pins: 1 A, 2 K, 3 K

## TCAN1043DMTRQ1
designator U?, comment TCAN1043
Ethernet Transceiver, 1-Trnsvr, PDSO14; Manufacturer: Texas Instruments; Manufacturer Part Number: TCAN1043DMTRQ1; Supplier: Mouser; Supplier Part Number: 595-TCAN1043DMTRQ1; RoHS: Yes; Category: Interface ICs; Stock: 28707; Pricing: 1=2.47, 10=1.84, 50=1.68, 100=1.51, 1000=1.33, 10000=1.16 (USD); Terminal Finish: Tin; JESD-609 Code: e3; Moisture Sensitivity Level: 2; Telecom IC Type: ETHERNET TRANSCEIVER; Reach SVHC Compliant: Yes; RoHS Compliant: Yes; ComponentLink1URL: https://www.ti.com:443/lit/ds/symlink/tcan1043-q1.pdf?src-supplier=IHS+Markit; ComponentLink1Description: https://www.ti.com:443/lit/ds/symlink/tcan1043-q1.pdf?src-supplier=IHS+Markit; ComponentLink2URL: http://www.ti.com/lit/ds/symlink/tcan1043-q1.pdf?src-supplier=Digikey; ComponentLink2Description: http://www.ti.com/lit/ds/symlink/tcan1043-q1.pdf?src-supplier=Digikey
footprint SON65P300X450X90-15N
pins: 1 TXD, 2 GND, 3 VCC, 4 RXD, 5 VIO, 6 EN, 7 INH, 8 NFAULT, 9 WAKE, 10 VSUP, 11 NC, 12 CANL, 13 CANH, 14 NSTB, 15 TPAD

## TMS5700332BPZQQ1
designator U?, comment TMS570
RISC Microcontroller, 32-Bit, FLASH, CORTEX-R4F CPU, 80MHz, CMOS, PQFP100; Manufacturer: Texas Instruments; Manufacturer Part Number: TMS5700332BPZQQ1; Supplier: Mouser; Supplier Part Number: 595-TMS5700332BPZQQ1; RoHS: Yes; Category: Microcontrollers; Stock: 411; Pricing: 1=12.28, 10=9.98, 50=9.52, 100=8.26, 1000=7.2, 10000=6.27 (USD); Terminal Finish: Nickel; JESD-609 Code: e4; Moisture Sensitivity Level: 3; Technology: CMOS; Reach SVHC Compliant: Yes; RoHS Compliant: Yes; ComponentLink1URL: https://www.ti.com:443/lit/ds/symlink/tms570ls0332.pdf?src-supplier=IHS+Markit; ComponentLink1Description: https://www.ti.com:443/lit/ds/symlink/tms570ls0332.pdf?src-supplier=IHS+Markit; ComponentLink2URL: https://www.ti.com/lit/ds/symlink/tms570ls0332.pdf?src-supplier=Digikey; ComponentLink2Description: https://www.ti.com/lit/ds/symlink/tms570ls0332.pdf?src-supplier=Digikey; ComponentLink3URL: http://www.ti.com/lit/gpn/tms570ls0332?src-supplier=Mouser; ComponentLink3Description: http://www.ti.com/lit/gpn/tms570ls0332?src-supplier=Mouser; ComponentLink4URL: http://www.ti.com/general/docs/lit/getliterature.tsp?genericPartNumber=TMS570LS0332&&fileType=pdf&src-supplier=Avnet; ComponentLink4Description: http://www.ti.com/general/docs/lit/getliterature.tsp?genericPartNumber=TMS570LS0332&&fileType=pdf&src-supplier=Avnet
footprint QFP50P1600X1600X160-100N
pins: 1 GIOA[0], 2 GIOA[1], 3 FLTP_1, 4 FLTP2, 5 GIOA[2], 6 VCCIO_1, 7 VSS_1, 8 GIOA[3], 9 GIOA[4], 10 GIOA[5], 11 N2HET[022], 12 GIOA[6], 13 VCC_1, 14 OSCIN, 15 KELVIN_GND, 16 OSCOUT, 17 VSS_2, 18 GIOA[7], 19 N2HET[0], 20 VSS_3, 21 VCC_2, 22 N2HET[2], 23 SPI2NCS[0], 24 TEST, 25 N2HET[4], 26 N2HET[6], 27 MIBSPI1NCS[2], 28 VCCIO_2, 29 VSS_4, 30 VCC_3, 31 NPORRST, 32 VCC_4, 33 VSS_5, 34 SPI3SOMI, 35 SPI3SIMO, 36 SPI3CLK, 37 SPI3NENA, 38 SPI3NCS[0], 39 MIBSPI1NCS[3], 40 ADIN[16], 41 ADIN[17], 42 ADIN[0], 43 ADIN[7], 44 ADIN[20], 45 ADIN[21], 46 VCCAD/ADREFHI, 47 VSSAD/ADREFLO, 48 ADIN[9], 49 ADIN[1], 50 ADIN[10], 51 ADIN[2], 52 ADIN[3], 53 ADIN[11], 54 ADIN[4], 55 ADIN[5], 56 ADIN[6], 57 ADIN[8], 58 ADEVT, 59 VSS_6, 60 VCCIO_3, 61 VCC_5, 62 CAN1TX, 63 CAN1RX, 64 N2HET[024], 65 MIBSPI1SIMO, 66 MIBSPI1SOMI, 67 MIBSPI1CLK, 68 MIBSPI1NENA, 69 SPI2SOMI, 70 SPI2SIMO, 71 SPI2CLK, 72 VSS_7, 73 MIBSPI1NCS[0], 74 N2HET[8], 75 TMS, 76 NTRST, 77 TDI, 78 TDO, 79 TCK, 80 RTCK, 81 NRST, 82 NERROR, 83 N2HET[10], 84 ECLK, 85 VCCIO_4, 86 VSS_8, 87 VSS_9, 88 VCC_6, 89 N2HET[12], 90 N2HET[14], 91 CAN2TX, 92 CAN2RX, 93 MIBSPI1NCS[1], 94 LINRX, 95 LINTX, 96 VCCP, 97 N2HET[16], 98 N2HET[18], 99 VCC_7, 100 VSS_10

## TNPW040217K2BEED
designator R?, comment 17k2
Fixed Resistor, Thin Film, 0.063W, 17200ohm, 50V, 0.1% +/-Tol, 25ppm/Cel, Surface Mount, 0402; Manufacturer: Vishay Dale; Manufacturer Part Number: TNPW040217K2BEED; Manufacturer Series: TNPW; Power: 63mW; Rated Temperature: 70°C; Value: 17.2kR; Temperature Coefficient (ppm/Cel): 25; Supplier: Mouser; Supplier Part Number: 71-TNPW040217K2BEED; RoHS: Yes; Category: Chip SMD Resistors; Stock: 8185; Pricing: 1=0.23, 10=0.192, 50=0.169, 100=0.159, 1000=0.134, 10000=0.113 (USD); Mounting Technology: Surface Mount; Pins: 2; Package Shape: Rectangular; Case/Package: 0402; Terminal Finish: Tin; Min Operating Temperature: -55°C; Max Operating Temperature: 125°C; Tolerance: 0.1%; JESD-609 Code: e3; Resistor Type: FIXED RESISTOR; Packaging: Tape and Reel; Technology: THIN FILM; Termination: Wraparound; Working Voltage: 50V; Reach SVHC Compliant: Yes; RoHS Compliant: Yes; ComponentLink1URL: https://datasheet.ciiva.com:443/pdfs/VipMasterIC/IC/DALE/DALES05753/DALES05753-1.pdf?src-supplier=IHS+Markit; ComponentLink1Description: https://datasheet.ciiva.com:443/pdfs/VipMasterIC/IC/DALE/DALES05753/DALES05753-1.pdf?src-supplier=IHS+Markit; ComponentLink2URL: http://www.vishay.com/docs/28758/tnpw_e3.pdf?src-supplier=Avnet; ComponentLink2Description: http://www.vishay.com/docs/28758/tnpw_e3.pdf?src-supplier=Avnet; ComponentLink3URL: http://www.vishay.com/docs/28758/tnpw_e3.pdf?src-supplier=Digikey; ComponentLink3Description: http://www.vishay.com/docs/28758/tnpw_e3.pdf?src-supplier=Digikey; ComponentLink4URL: http://www.vishay.com/docs/49252/_dbr_smd_resistor_product_overview_vmn_sg2189_1705.pdf?src-supplier=Digikey; ComponentLink4Description: http://www.vishay.com/docs/49252/_dbr_smd_resistor_product_overview_vmn_sg2189_1705.pdf?src-supplier=Digikey
footprint R0402
pins: 1, 2